# Altium integrated library 1757255.IntLib: 1 symbol
Pins are listed as number, name and electrical type; pins without a type are passive.

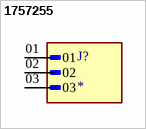
[diagram p0: symbol 1757255]

## 1757255
designator J?
Pluggable Header 5.08mm 12AWG 320V 12A 3 Position COMBICON MSTBA Series | Phoenix Contact 1757255; SnapEDA_Link: https://www.snapeda.com/parts/1757255/Phoenix+Contact/view-part/?ref=snap; Package: None; Value: *; MF: Phoenix Contact; MP: 1757255; Check_prices: https://www.snapeda.com/parts/1757255/Phoenix+Contact/view-part/?ref=eda
footprint PHOENIX_1757255
pins: 01, 02, 03